# Altium footprint library Footprints.PcbLib: 320 footprints (part 11 of 20)
Each footprint in its own frame and in the unit in brackets; x right, y up, seen from the top. Pads: shape width x height; smd on the part's side, far side on the other; paste and mask are expansions set on the pad; w line width, h text height; cw(c..) or ccw(c..) is an arc to the next point about the centre after c.
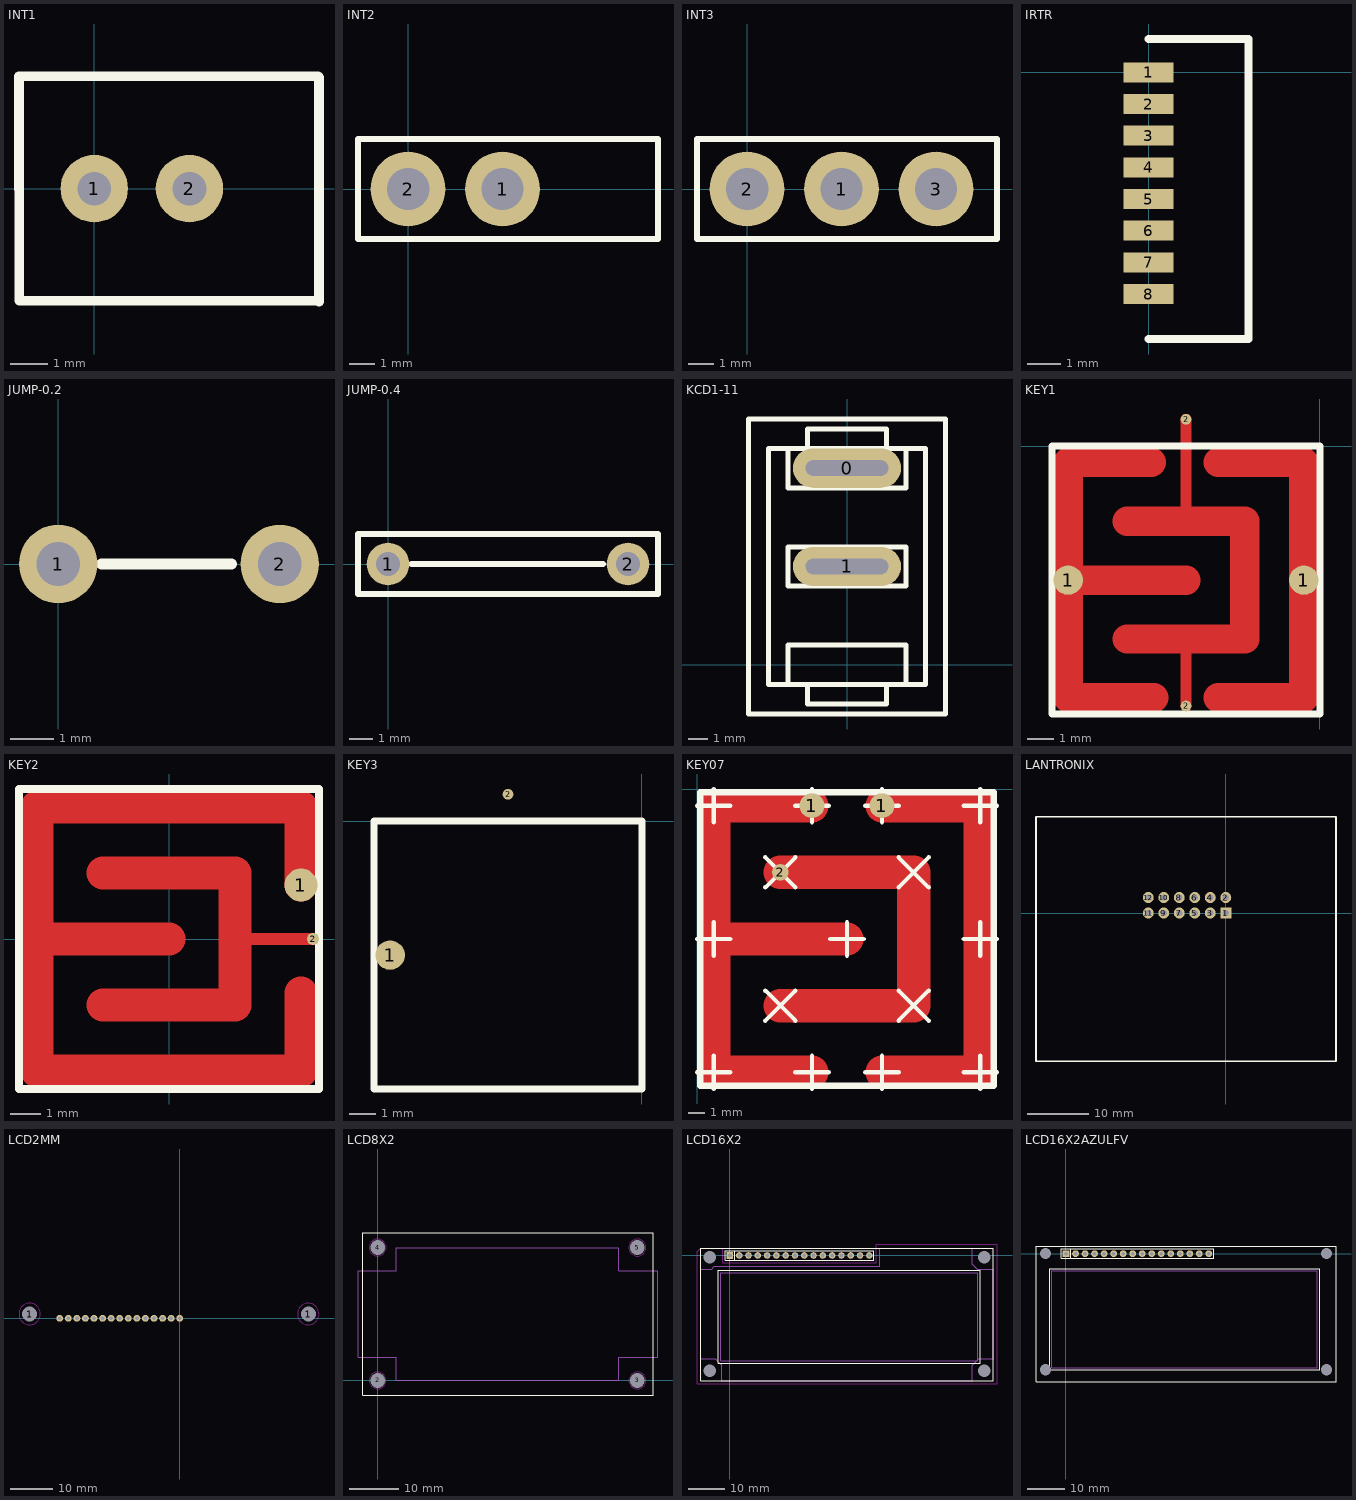
[diagram p10: the footprints below, top view; thin cyan lines are the x and y axes]

## INT1 [mm]
pads (2):
  round 1.8 hole 0.9: 1(0,0) 2(2.54,0)
Top Overlay:
  lines w0.254: -2.01,-0.02 -2.01,3 5.98,3 6,2.98 6,-3.02 5.98,-3 -2,-3 -2,0

## INT2 [mm]
pads (2):
  round 3 hole 1.7: 1(3.78,0) 2(0,0)
Top Overlay:
  lines w0.254: -2,-2 10,-2 10,2 -2,2 -2,-2

## INT3 [mm]
pads (3):
  round 3 hole 1.7: 1(3.78,0) 2(0,0) 3(7.56,0)
Top Overlay:
  lines w0.254: -2,-2 10,-2 10,2 -2,2 -2,-2

## IRTR [mm]
pads (8):
  rect 1.5x0.6 smd: 1(0,0) 2(0,-0.95) 3(0,-1.9) 4(0,-2.85) 5(0,-3.8) 6(0,-4.75) 7(0,-5.7) 8(0,-6.65)
Top Overlay:
  lines w0.254: 0,-8 3,-8 3,1 0,1

## JUMP-0.2 [mm]
pads (2):
  round 1.8 hole 1: 1(0,0) 2(5.08,0)
Top Overlay:
  lines w0.254: 0.99,0 3.97,0

## JUMP-0.4 [mm]
pads (2):
  round 1.8 hole 1: 1(0,0) 2(10.16,0)
Top Overlay:
  lines w0.254: 0.99,0 9.1,0 ; -1.27,-1.27 11.43,-1.27 11.43,1.27 -1.27,1.27 -1.27,-1.27

## KCD1-11 [mm]
pads (2):
  oval 5.5x2 hole 0.8 slot 4.2 at 0 deg: 0(0,10) 1(0,5)
Top Overlay:
  lines w0.254: -3,-1 -3,1 3,1 3,-1 ; -2,-1 -2,-2 2,-2 2,-1 ; -2,11 -2,12 2,12 2,11 ; -5,-2.5 5,-2.5 5,12.5 -5,12.5 -5,-2.5 ; -4,-1 4,-1 4,11 -4,11 -4,-1 ; -3,4 3,4 3,6 -3,6 -3,4 ; -3,9 3,9 3,11 -3,11 -3,9
Mechanical 1:
  lines w0.254: -1.651,5 1.651,5 ; -1.651,10 1.651,10

## KEY1 [mm]
pads (4):
  round 1.1 smd: 1(-9.4,-5) 1(-0.6,-5)
  round 0.4 smd: 2(-5,-9.7) 2(-5,1)
Top Layer:
  lines w0.4: -5,-9.7 -5,-7.2 ; -5,-2.8 -5,1
  lines w1.1: -9.4,-5 -5,-5 ; -7.2,-7.2 -2.8,-7.2 -2.8,-2.8 -7.2,-2.8 ; -6.3,-0.6 -9.4,-0.6 -9.4,-9.4 -6.2,-9.4 ; -3.8,-9.4 -0.6,-9.4 -0.6,-0.6 -3.8,-0.6
Top Overlay:
  lines w0.254: -10,-10 0,-10 0,0 -10,0 -10,-10

## KEY2 [mm]
pads (2):
  round 1.1 smd: 1(4.4,1.8)
  round 0.4 smd: 2(4.8,0)
Top Layer:
  lines w0.4: 2.2,0 4.8,0
  lines w1.1: -4.4,0 0,0 ; -2.2,-2.2 2.2,-2.2 2.2,2.2 -2.2,2.2 ; 4.4,-1.8 4.4,-4.4 -4.4,-4.4 -4.4,4.4 4.4,4.4 4.4,1.8
Top Overlay:
  lines w0.254: -5,-5 -5,5 5,5 5,-5 -5,-5

## KEY3 [mm]
pads (2):
  round 1.1 smd: 1(-9.4,-5)
  round 0.4 smd: 2(-5,1)
Top Overlay:
  lines w0.254: -10,-10 -10,0 0,0 0,-10 -10,-10

## KEY07 [mm]
pads (3):
  round 1.5 smd: 1(6.9,-1) 1(11.1,-1)
  round 1 smd: 2(5,-5)
Top Layer:
  lines w2: 1,-9 9,-9 ; 5,-13 13,-13 13,-5 5,-5 ; 6.9,-17 1,-17 1,-1 6.9,-1 ; 11.1,-17 17,-17 17,-1 11.1,-1
Top Overlay:
  lines w0.254: 0,-17 2,-17 ; 0,-9 2,-9 ; 0,-1 2,-1 ; 1,-18 1,-16 ; 1,-10 1,-8 ; 1,-2 1,0 ; 4.1,-13.9 5,-13 ; 4.1,-12.1 5,-13 ; 4.1,-5.9 5,-5 ; 4.1,-4.1 5,-5 ; 5.9,-17 7.9,-17 ; 5.9,-13.9 5,-13 ; 5.9,-12.1 5,-13 ; 5.9,-5.9 5,-5 ; 5.9,-4.1 5,-5 ; 5.9,-1 7.9,-1 ; 6.9,-18 6.9,-16 ; 6.9,-2 6.9,0 ; 8,-9 10,-9 ; 9,-10 9,-8 ; 10.1,-17 12.1,-17 ; 10.1,-1 12.1,-1 ; 11.1,-18 11.1,-16 ; 11.1,-2 11.1,0 ; 12.1,-13.9 13,-13 ; 12.1,-12.1 13,-13 ; 12.1,-5.9 13,-5 ; 12.1,-4.1 13,-5 ; 13.9,-13.9 13,-13 ; 13.9,-12.1 13,-13 ; 13.9,-5.9 13,-5 ; 13.9,-4.1 13,-5 ; 16,-17 18,-17 ; 16,-9 18,-9 ; 16,-1 18,-1 ; 17,-18 17,-16 ; 17,-10 17,-8 ; 17,-2 17,0
  lines w0.4: 0.2,-17.8 0.2,-0.2 17.8,-0.2 17.8,-17.8 0.2,-17.8

## LANTRONIX [mm]
pads (12):
  rect 1.8x1.8 hole 1: 1(0,0)
  round 1.8 hole 1: 2(0,2.54) 3(-2.54,0) 4(-2.54,2.54) 5(-5.08,0) 6(-5.08,2.54) 7(-7.62,0) 8(-7.62,2.54) 9(-10.16,0) 10(-10.16,2.54) 11(-12.7,0) 12(-12.7,2.54)
Top Overlay:
  lines w0.254: -31.09,-24.257 18.059,-24.257 18.059,15.748 -31.09,15.748 -31.09,-24.257

## LCD2MM [mm]
pads (17):
  round 3 hole 3.5: 1(-35,1) 1(30,1)
  round 1.6 hole 0.9: 1(0,0) 2(-2,0) 3(-4,0) 4(-6,0) 5(-8,0) 6(-10,0) 7(-12,0) 8(-14,0) 9(-16,0) 10(-18,0) 11(-20,0) 12(-22,0) 13(-24,0) 14(-26,0) 15(-28,0)
Keep-Out Layer:
  circle w0.254: c-35,1 r2.5
  circle w0.254: c30,1 r2.5

## LCD8X2 [mm]
pads (4):
  round 1.8 hole 3: 2(0,0) 3(52.8,0) 4(0,27) 5(52.8,27)
Top Overlay:
  lines w0.254: -3,-3 56,-3 56,30 -3,30 -3,-3
Keep-Out Layer:
  circle w0.254: c0,0 r1.703
  circle w0.254: c52.8,0 r1.712
  circle w0.254: c0,27 r1.712
  circle w0.254: c52.8,27 r1.726
Mechanical 1:
  lines w0.254: -4,4.75 3.75,4.75 3.75,0 49.05,0 49.05,4.75 57,4.75 57,22.25 49.05,22.25 49.05,27 3.75,27 3.75,22.25 -4,22.25 -4,4.75

## LCD16X2 [mm]
pads (20):
  rect 1.8x1.8 hole 1: 1(0,0)
  round 1.8 hole 1: 2(2.54,0) 3(5.08,0) 4(7.62,0) 5(10.16,0) 6(12.7,0) 7(15.24,0) 8(17.78,0) 9(20.32,0) 10(22.86,0) 11(25.4,0) 12(27.94,0) 13(30.48,0) 14(33.02,0) 15(35.56,0) 16(38.1,0)
  round 3 hole 3.5: ""(-5.5,-31.5) ""(-5.5,-0.5) ""(69.5,-31.5) ""(69.5,-0.5)
Top Overlay:
  lines w0.254: 1.27,-1.27 1.27,1.27 ; -8,-34.2 -8,2 72,2 72,-34.2 -8,-34.2 ; -3.2,-29.5 68.4,-29.5 68.4,-4 -3.2,-4 -3.2,-29.5 ; -1.27,-1.27 39.37,-1.27 39.37,1.27 -1.27,1.27 -1.27,-1.27
Keep-Out Layer:
  lines w0.254: -9,-4.01 -9,-35 73,-35 73,3 40,3 40,2 40,-2 -2,-2 -2,1.97 -2.03,2 -8.01,2 -8.99,1.02 -8.99,-4
Mechanical 1:
  lines w0.254: -0.01,-3 41,-3 41,2 66.25,2 ; 0,-3 -4.25,-3 -5,-3.75 -8,-3.75 -8,-28.25 -4,-28.25 -2.25,-30 -2.25,-34.19 -2.26,-34.2 66.25,-34.2 66.25,-30 68,-28.25 72,-28.25 72,-3.75 67.54,-3.75 66.25,-2.46 66.25,1.99 ; -2.5,-28.8 67.7,-28.8 67.7,-4.7 -2.5,-4.7 -2.5,-28.8

## LCD16X2AZULFV [mm]
pads (20):
  rect 1.8x1.8 hole 1: 1(0,0)
  round 1.8 hole 1: 2(2.54,0) 3(5.08,0) 4(7.62,0) 5(10.16,0) 6(12.7,0) 7(15.24,0) 8(17.78,0) 9(20.32,0) 10(22.86,0) 11(25.4,0) 12(27.94,0) 13(30.48,0) 14(33.02,0) 15(35.56,0) 16(38.1,0)
  round 2.5 hole 3: ""(-5.5,-31) ""(-5.5,0) ""(69.5,-31) ""(69.5,0)
Top Overlay:
  lines w0.254: 1.27,-1.27 1.27,1.27 ; -8,-34.2 -8,2 72,2 72,-34.2 -8,-34.2 ; -4.4,-31 -4.4,-4 67.6,-4 67.6,-31 -4.4,-31 ; -1.27,-1.27 39.37,-1.27 39.37,1.27 -1.27,1.27 -1.27,-1.27
Mechanical 1:
  lines w0.254: -3.8,-30.4 -3.8,-4.6 67,-4.6 67,-30.4 -3.8,-30.4